# Altium footprint library SOP.PcbLib: 19 footprints (part 2 of 2)
Each footprint in its own frame and in the unit in brackets; x right, y up, seen from the top. Pads: shape width x height; smd on the part's side, far side on the other; paste and mask are expansions set on the pad; w line width, h text height; cw(c..) or ccw(c..) is an arc to the next point about the centre after c.
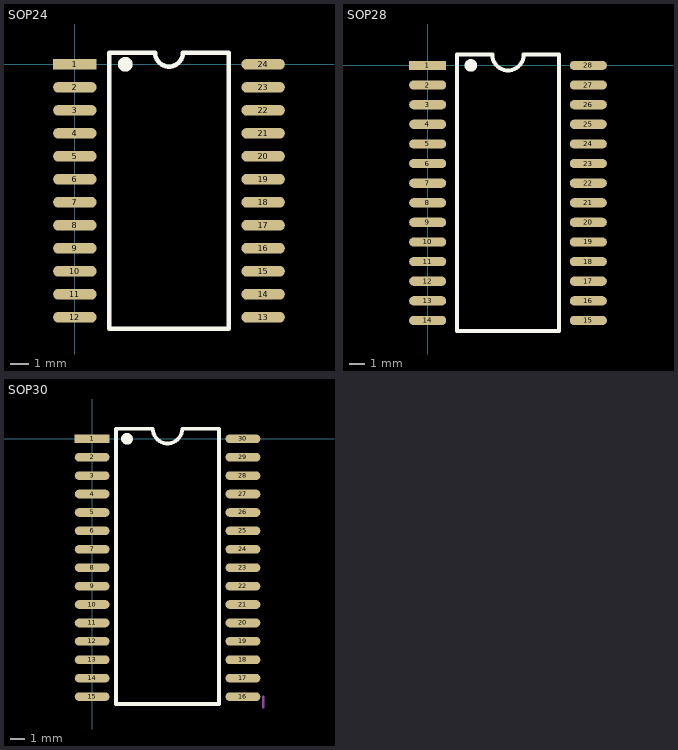
[diagram p1: the footprints below, top view; thin cyan lines are the x and y axes]

## SOP24 [mm]
height 10
pads (24):
  rect 2.4x0.6 smd: 1(0,0)
  oval 2.4x0.6 smd: 2(0,-1.27) 3(0,-2.54) 4(0,-3.81) 5(0,-5.08) 6(0,-6.35) 7(0,-7.62) 8(0,-8.89) 9(0,-10.16) 10(0,-11.43) 11(0,-12.7) 12(0,-13.97) 13(10.4,-13.97) 14(10.4,-12.7) 15(10.4,-11.43) 16(10.4,-10.16) 17(10.4,-8.89) 18(10.4,-7.62) 19(10.4,-6.35) 20(10.4,-5.08) 21(10.4,-3.81) 22(10.4,-2.54) 23(10.4,-1.27) 24(10.4,0)
Top Overlay:
  circle w0.5: c2.787,0 r0.155
  lines w0.254: 1.898,-14.605 1.898,0.635 4.438,0.635 ccw(c5.2,0.635) 5.962,0.635 8.502,0.635 8.502,-14.605 1.898,-14.605
3D body "SOP24.STEP": height 2.7, standoff 0, extent -0.149,-14.689 10.157,0.711

## SOP28 [mm]
pads (28):
  rect 2.4x0.6 smd: 1(0,0)
  oval 2.4x0.6 smd: 2(0,-1.27) 3(0,-2.54) 4(0,-3.81) 5(0,-5.08) 6(0,-6.35) 7(0,-7.62) 8(0,-8.89) 9(0,-10.16) 10(0,-11.43) 11(0,-12.7) 12(0,-13.97) 13(0,-15.24) 14(0,-16.51) 15(10.4,-16.51) 16(10.4,-15.24) 17(10.4,-13.97) 18(10.4,-12.7) 19(10.4,-11.43) 20(10.4,-10.16) 21(10.4,-8.89) 22(10.4,-7.62) 23(10.4,-6.35) 24(10.4,-5.08) 25(10.4,-3.81) 26(10.4,-2.54) 27(10.4,-1.27) 28(10.4,0)
Top Overlay:
  circle w0.5: c2.794,0 r0.155
  lines w0.254: 6.216,0.695 8.502,0.695 8.502,-17.205 1.898,-17.205 1.898,0.695 4.184,0.695 ccw(c5.2,0.695) 6.216,0.695
3D body "SOP28.STEP": height 2.7, standoff 0, extent 0.029,-17.214 10.334,0.686

## SOP30 [mm]
pads (30):
  rect 2.4x0.6 smd: 1(0,0)
  oval 2.4x0.6 smd: 2(0,-1.27) 3(0,-2.54) 4(0,-3.81) 5(0,-5.08) 6(0,-6.35) 7(0,-7.62) 8(0,-8.89) 9(0,-10.16) 10(0,-11.43) 11(0,-12.7) 12(0,-13.97) 13(0,-15.24) 14(0,-16.51) 15(0,-17.78) 16(10.4,-17.78) 17(10.4,-16.51) 18(10.4,-15.24) 19(10.4,-13.97) 20(10.4,-12.7) 21(10.4,-11.43) 22(10.4,-10.16) 23(10.4,-8.89) 24(10.4,-7.62) 25(10.4,-6.35) 26(10.4,-5.08) 27(10.4,-3.81) 28(10.4,-2.54) 29(10.4,-1.27) 30(10.4,0)
Top Overlay:
  circle w0.5: c2.406,0 r0.155
  lines w0.254: 6.216,0.695 8.756,0.695 8.756,-18.288 1.644,-18.288 1.644,0.695 4.184,0.695 ccw(c5.2,0.695) 6.216,0.695
Mechanical 15:
  lines w0.15: 11.804,-18.542 11.804,-17.78
3D body "SOP30.STEP": height 2.7, standoff 0, extent -0.022,-18.39 10.284,0.61